# Altium schematic symbol library GNT604.SCHLIB: 37 symbols
Pins are listed as number, name and electrical type; pins without a type are passive.

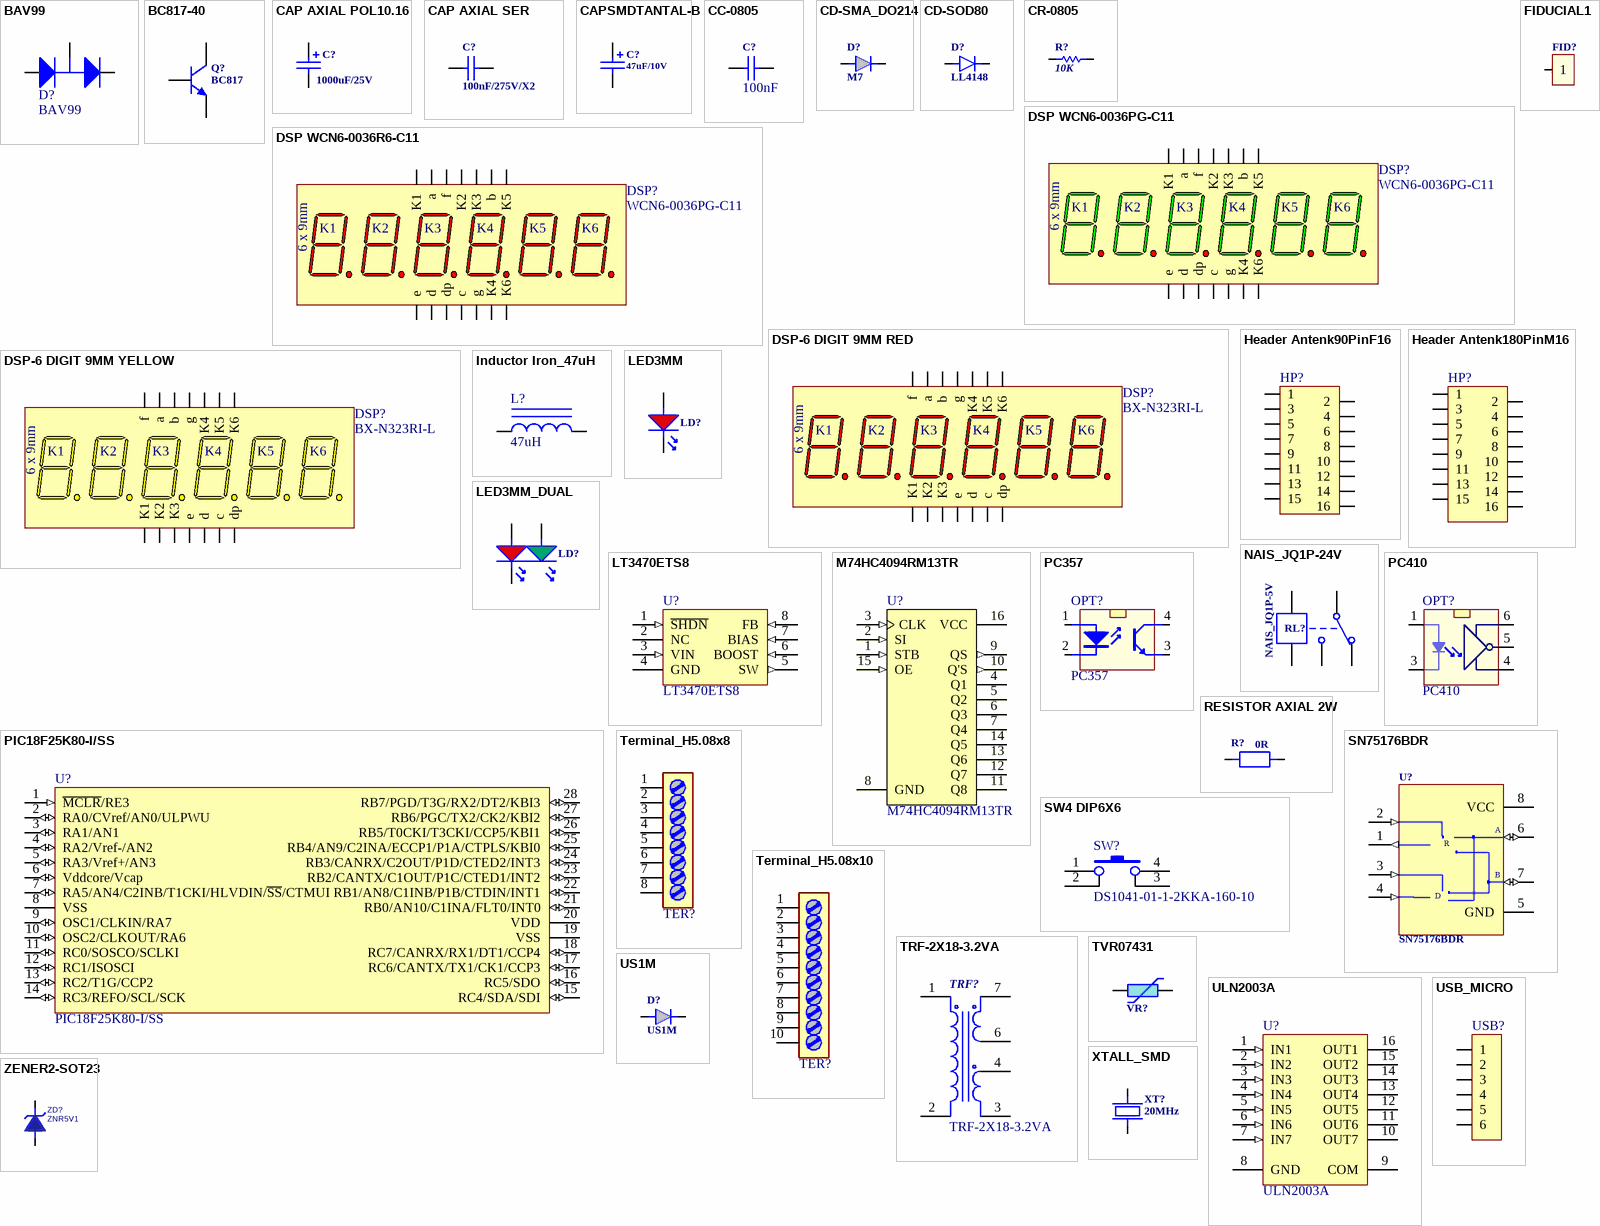
[diagram p0: symbols BAV99 to ZENER2-SOT23]

## BAV99
designator D?
Ultrafast, Soft Recovery Diode
footprint SOT23_N (SOT23, 3-Leads, Body 2.9x1.3mm, Pitch 0.95mm, Lead Span 2.3mm, IPC Medium Density)
pins: 1 A1, 2 K2, 3 AK

## BC817-40
designator Q?, comment BC817
NPN General Purpose Amplifier; Text Field7: Published 29-Sep-2000
footprint BCY-W3/D5.2
footprint SOT23
footprint SOT23_N (SOT23, 3-Leads, Body 2.9x1.3mm, Pitch 0.95mm, Lead Span 2.3mm, IPC Medium Density)
pins: 1 B, 2 E, 3 C

## CAP AXIAL POL10.16
designator C?, comment 1000uF/25V
Polarized Capacitor - Standard
footprint CAP5.08POL-10.16
simulation model CAP (Capacitor)
pins: 1 +, 2 -

## CAP AXIAL SER
designator C?, comment 100nF/275V/X2
Ceramic Capacitor - Standard
footprint CAPAXIAL/275V/X2 (Footprint not found)
simulation model CAP (Capacitor)
pins: 1, 2

## CAPSMDTANTAL-B
designator C?, comment 47uF/10V
CA45 Chip Tantalum Capacitors; Published: *; Publisher: *; Manufacturer: *; Class: *; SubClass: *
footprint CAP5.08P
footprint CAPSMDTANTAL-B
pins: 1 +, 2 -
2 alternate drawings of the same symbol

## CC-0805
designator C?, comment 100nF
Ceramic Chip Capacitor - Standard
footprint CC0805 (Footprint not found)
simulation model CAP (Capacitor)
signal-integrity model C0805
pins: 1, 2

## CD-SMA_DO214
designator D?, comment M7
ChipDiodeSMA
footprint CD-SMA_DO214 (Footprint not found)
pins: 1 A, 2 K

## CD-SOD80
designator D?, comment LL4148
ChipDiode-MiniMELF-SOD80
footprint CD-SOD80 (Footprint not found)
pins: 1 A, 2 K

## CR-0805
designator R?, comment 10K
ChipResistor0805; Published: 8-Jun-2000; LatestRevisionDate: 17-Jul-2002; LatestRevisionNote: Re-released for DXP Platform.; PackageReference: AXIAL-0.3; Publisher: Altium Limited
footprint CR0805 (Footprint not found)
simulation model RESISTOR (Resistor)
signal-integrity model Res
pins: 1, 2

## DSP WCN6-0036PG-C11
designator DSP?, comment WCN6-0036PG-C11
LED DISPLAY 9,20MM 6DIGIT (-) ULTRA GREEN; Part Number: DSP WCN6-0036PG-C11
footprint WCN6-0036XX-C11 (Footprint not found)
pins: 1 e "Anode", 2 d "Anode", 3 dp "Cathode", 4 c "Cathode", 5 g "Anode", 6 K4 "Anode", 7 K6 "Anode", 8 K5 "Anode", 9 b "Cathode", 10 K3 "Cathode", 11 K2 "Cathode", 12 f "Anode", 13 a "Anode", 14 K1 "Anode"
text: 6 x 9mm

## DSP WCN6-0036R6-C11
designator DSP?, comment WCN6-0036PG-C11
LED DISPLAY 9,20MM 6DIGIT (-) ULTRA GREEN; Part Number: WCN6-0036R6-C11
footprint WCN6-0036XX-C11 (Footprint not found)
pins: 1 e "Anode", 2 d "Anode", 3 dp "Cathode", 4 c "Cathode", 5 g "Anode", 6 K4 "Anode", 7 K6 "Anode", 8 K5 "Anode", 9 b "Cathode", 10 K3 "Cathode", 11 K2 "Cathode", 12 f "Anode", 13 a "Anode", 14 K1 "Anode"
text: 6 x 9mm

## DSP-6 DIGIT 9MM RED
designator DSP?, comment BX-N323RI-L
LED DISPLAY 9,20MM 6DIGIT (-) ULTRA RED; Package Information: Latest Revision: 19-Feb-2002; Min. Intensity: 360 ucd; Note: IF = 5 mA; Note: Pins 1 and 6 are redundant Cathodes.; Datasheet: Latest Revision: 19-Feb-2002; Package Reference: A; Publisher: Altium Limited; Colour: HE Red
footprint BX-N323RI-L
pins: A a "Anode", B b "Cathode", C c "Cathode", D d "Anode", DP dp "Cathode", E e "Anode", F f "Anode", G g "Anode", K1 "Anode", K2 "Cathode", K3 "Cathode", K4 "Anode", K5 "Anode", K6 "Anode"
text: 6 x 9mm

## DSP-6 DIGIT 9MM YELLOW
designator DSP?, comment BX-N323RI-L
LED DISPLAY 9,20MM 6DIGIT (-) ULTRA YELLOW; Package Information: Latest Revision: 19-Feb-2002; Min. Intensity: 360 ucd; Note: IF = 5 mA; Note: Pins 1 and 6 are redundant Cathodes.; Datasheet: Latest Revision: 19-Feb-2002; Package Reference: A; Publisher: Altium Limited; Colour: HE Red
footprint BX-N323RI-L
pins: A a "Anode", B b "Cathode", C c "Cathode", D d "Anode", DP dp "Cathode", E e "Anode", F f "Anode", G g "Anode", K1 "Anode", K2 "Cathode", K3 "Cathode", K4 "Anode", K5 "Anode", K6 "Anode"
text: 6 x 9mm

## FIDUCIAL1
designator FID?  (value not drawn)
footprint FIDUCIAL1
pins: 1

## Header Antenk90PinF16
designator HP?, comment DS1015-05_CONFLY  (value not drawn)
Header, 16-Pin, 90 DEGREES; Revision: 17-Jul-2002: Re-released for DXP Platform.; Publisher: Altium Limited
footprint HeaderAntenk90Pin16
signal-integrity model Connector
pins: 1, 2, 3, 4, 5, 6, 7, 8, 9, 10, 11, 12, 13, 14, 15, 16

## Header Antenk180PinM16
designator HP?, comment DS1015-07_CONFLY  (value not drawn)
Header, 16-Pin, 180 DEGREES; Revision: 17-Jul-2002: Re-released for DXP Platform.; Publisher: Altium Limited
footprint HeaderAntenk180Pin16 (Footprint not found)
signal-integrity model Connector
pins: 1, 2, 3, 4, 5, 6, 7, 8, 9, 10, 11, 12, 13, 14, 15, 16

## Inductor Iron_47uH
designator L?, comment 47uH
Magnetic-Core Inductor_SMD; Published: 24-Mar-1999; Revision: July-2002: Re-released for DXP Platform.; Publisher: Altium Limited
simulation model INDUCTOR (Inductor)
signal-integrity model Inductor Iron
footprint INDC2.5X3.3 (Chip Inductor, Body 4.5x1.6mm, IPC Low Density)
pins: 1, 2

## LED3MM
designator LD?, comment Led  (value not drawn)
Led 3mm - RED
footprint LED_3MM
pins: 1 A, 2 K

## LED3MM_DUAL
designator LD?, comment Led_dual  (value not drawn)
Led 3mm dual - RED-GREEN
footprint LEDDUAL_3MM
pins: 1 A1, 2 K1K2, 3 A2

## LT3470ETS8
designator U?
200mA, Micropower Buck Regulator; Note: 1916; Published: 30-May-2008; DatasheetVersion: Aug-2007; PackageVersion: revA, 2000; PackageReference: MS8; Publisher: Altium Limited; PackageDescription: 8-Pin Thin Small Outline Package 0.65 mm Pitch; ComponentLink1Description: Manufacturer Link; ComponentLink1URL: http://www.linear.com/; ComponentLink2Description: Datasheet; ComponentLink2URL: http://www.linear.com/pc/downloadDocument.do?navId=H0,C1,C1003,C1040,C1055,P1378,D3343
footprint TS8_N (SOT23, 5-Leads, Body 3x1.6mm, Pitch 0.95mm, Lead Span 2.8mm, IPC Medium Density)
footprint MS8_L (TSOP, 8-Leads, Body 3x3mm, Pitch 0.65mm, IPC High Density)
footprint MS8_M (TSOP, 8-Leads, Body 3x3mm, Pitch 0.65mm, IPC Low Density)
pins: 1 ~{SHDN} (in), 2 NC (power), 3 VIN (in), 4 GND (power), 5 SW (out), 6 BOOST (in), 7 BIAS (in), 8 FB (in)

## M74HC4094RM13TR
designator U?
8 Bit SIPO Shift Latch Register (3-State); Published: 8-Jun-2000; LatestRevisionDate: 6-Jun-2005; LatestRevisionNote: Stylized 3D Model Added.; DatasheetDocument: Feb-1993; PackageDocument: May-1998; PackageReference: SO16; Publisher: Altium Limited; ComponentLink1Description: Manufacturer Link; ComponentLink1URL: http://www.st.com/; ComponentLink2Description: Datasheet; ComponentLink2URL: http://www.st.com/stonline/products/literature/ds/1972/m74hc4094.pdf
footprint SO-16
pins: 1 STB (in), 2 SI (in), 3 CLK (in), 4 Q1 (hiz), 5 Q2 (hiz), 6 Q3 (hiz), 7 Q4 (hiz), 8 GND (power), 9 QS (out), 10 Q'S (out), 11 Q8 (hiz), 12 Q7 (hiz), 13 Q6 (hiz), 14 Q5 (hiz), 15 OE (in), 16 VCC (power)

## NAIS_JQ1P-24V
designator RL?, comment NAIS_JQ1P-5V
Single-Pole Dual-Throw Relay; Published: 24-Mar-1999; Revision: July-2002: Re-released for DXP Platform.; Publisher: Altium Limited
footprint NAIS_JQ1P-XXV
pins: 1 COM, 2 NC, 3 NO, 4 A1, 5 A2

## PC357
designator OPT?
Optoisolator
footprint SO-4
pins: 1 A, 2 K, 3 E, 4 C

## PC410
designator OPT?
Ultra-high Speed Response  OPIC Photocoupler
footprint SO-5 (Footprint not found)
pins: 1, 3, 4, 5, 6

## PIC18F25K80-I/SS
designator U?
Flash Microcontroller with 10-Bit A/D and nanoWatt Technology, 32K Flash, 28-Pin SSOP, Industrial Temperature Range, Tape and Reel; FirstPublished: 29-Jan-2009; LatestRevisionDate: 02-Dec-2009; LatestRevisionNote: Updated to datasheet revision F, Sep-2009; DatasheetVersion: revF, Sep-2009; PackageVersion: revBB, Aug-2009; PackageReference: SSOP-SS28; Publisher: Altium Limited; PackageDescription: 28-Lead Plastic Shrink Small Outline (SS) - 5.3mm Body [SSOP]; Supplier 1: Digi-Key; Supplier Part Number 1: PIC18F25K20T-I/SSTR-ND; Supplier 2: Digi-Key; Supplier Part Number 2: PIC18F25K20T-I/SSCT-ND; Supplier 3: Digi-Key; Supplier Part Number 3: PIC18F25K20T-I/SSDKR-ND; Supplier 4: Newark; Supplier Part Number 4: 88K5991; Code_JEDEC: MS-150; Code_IPC: SOP65P780-28; ComponentLink1Description: Datasheet; ComponentLink1URL: http://ww1.microchip.com/downloads/en/DeviceDoc/41303F.pdf; ComponentLink2Description: Packaging Specification; ComponentLink2URL: http://www.microchip.com/stellent/groups/techpub_sg/documents/packagingspec/en012702.pdf; ComponentLink3Description: Microchip.com Home; ComponentLink3URL: http://www.microchip.com/
footprint SSOP-SS28_N (SOP, 28-Leads, Body 10.2x5.2mm, Pitch 0.65mm, IPC Medium Density)
footprint SSOP-SS28_L (SOP, 28-Leads, Body 10.2x5.2mm, Pitch 0.65mm, IPC High Density)
footprint SSOP-SS28_M (SOP, 28-Leads, Body 10.2x5.2mm, Pitch 0.65mm, IPC Low Density)
pins: 1 ~{MCLR}/RE3 (in), 2 RA0/CVref/AN0/ULPWU (io), 3 RA1/AN1 (io), 4 RA2/Vref-/AN2 (io), 5 RA3/Vref+/AN3 (io), 6 Vddcore/Vcap (io), 7 RA5/AN4/C2INB/T1CKI/HLVDIN/~{SS}/CTMUI (io), 8 VSS (power), 9 OSC1/CLKIN/RA7 (io), 10 OSC2/CLKOUT/RA6 (io), 11 RC0/SOSCO/SCLKI (io), 12 RC1/ISOSCI (io), 13 RC2/T1G/CCP2 (io), 14 RC3/REFO/SCL/SCK (io), 15 RC4/SDA/SDI (io), 16 RC5/SDO (io), 17 RC6/CANTX/TX1/CK1/CCP3 (io), 18 RC7/CANRX/RX1/DT1/CCP4 (io), 19 VSS (power), 20 VDD (power), 21 RB0/AN10/C1INA/FLT0/INT0 (io), 22 RB1/AN8/C1INB/P1B/CTDIN/INT1 (io), 23 RB2/CANTX/C1OUT/P1C/CTED1/INT2 (io), 24 RB3/CANRX/C2OUT/P1D/CTED2/INT3 (io), 25 RB4/AN9/C2INA/ECCP1/P1A/CTPLS/KBI0 (io), 26 RB5/T0CKI/T3CKI/CCP5/KBI1 (io), 27 RB6/PGC/TX2/CK2/KBI2 (io), 28 RB7/PGD/T3G/RX2/DT2/KBI3 (io)

## RESISTOR AXIAL 2W
designator R?, comment 0R
Axial Resistor 2W
footprint CR-0805 (Footprint not found)
footprint RES10.16_1/4W_1
footprint RES_AXIAL2W
pins: 1, 2

## SN75176BDR
designator U?
Low-Power,RS-485/RS-422 Transceiver; PackageDocument: RevB, 21-0043; Published: 16-Jan-2001; LatestRevisionDate: 6-Jun-2005; LatestRevisionNote: Stylized 3D Model Added.; DatasheetDocument: Feb-1996; PackageReference: PA8; Publisher: Altium Limited; Code_JEDEC: MS-001-AB; ComponentLink1Description: Manufacturer Link; ComponentLink1URL: http://www.maxim-ic.com/; ComponentLink2Description: Datasheet; ComponentLink2URL: http://pdfserv.maxim-ic.com/en/ds/MAX1487-MAX491.pdf
footprint SO-8
3D model SO-8 (PCB3D Model)
pins: 1 RO (out), 2 ~{RE} (in), 3 DE (in), 4 DI (in), 5 GND (power), 6 A (io), 7 B (io), 8 VCC (power)
text: R; D

## SW4 DIP6X6
designator SW?, comment DS1041-01-1-2KKA-160-10
TACHT SWITCH DIP6X6
footprint SW4 DIP6X6 (Footprint not found)
pins: 1, 2, 3, 4

## Terminal_H5.08x8
designator TER?  (value not drawn)
Terminal Block Horizontal 5.08mm 8 pin
footprint PHONIX2(5.08)
footprint Terminal_H5.08x8
pins: 1, 2, 3, 4, 5, 6, 7, 8

## Terminal_H5.08x10
designator TER?  (value not drawn)
Terminal Block Horizontal 5.08mm 10 pin
footprint PHONIX2(5.08)
footprint Terminal_H5.08x10 (Footprint not found)
pins: 1, 2, 3, 4, 5, 6, 7, 8, 9, 10

## TRF-2X18-3.2VA
designator TRF?
Text Field7: Published 8-Jun-2000
footprint TRF-EI38/13,5
pins: 1 Pri+, 2 Pri-, 3 Sec1+, 4 Sec1-, 6 Sec2+, 7 Sec2-

## TVR07431
designator VR?  (value not drawn)
Varistor (Voltage-Sensitive Resistor)-275V; Published: 24-Mar-1999; Revision: July-2002: Re-released for DXP Platform.; Publisher: Altium Limited
footprint TVR07431 (Footprint not found)
pins: 1, 2

## ULN2003A
designator U?
Seven Darlington Array; Published: 8-Jun-2000; LatestRevisionDate: 13-Apr-2006; LatestRevisionNote: IPC-7351 Footprint Added.; DatasheetVersion: Sep-1998; PackageVersion: May-1998; PackageReference: SO16; Publisher: Altium Limited; PackageDescription: 16-Pin Small Outline Integrated Circuit 1.27 mm Pitch; Code_IPC: SOIC127P600-16; ComponentLink1Description: Manufacturer Link; ComponentLink1URL: http://www.st.com/; ComponentLink2Description: Datasheet; ComponentLink2URL: http://www.st.com/stonline/products/literature/ds/5279/uln2001.pdf
footprint SO-16
footprint SO16_L (SOIC, 16-Leads, Body 9.9x3.9mm, Pitch 1.27mm, IPC High Density)
footprint SO16_M (SOIC, 16-Leads, Body 9.9x3.9mm, Pitch 1.27mm, IPC Low Density)
3D model SO16 (16-Pin Small Outline Integrated Circuit 1.27 mm Pitch)
pins: 1 IN1 (in), 2 IN2 (in), 3 IN3 (in), 4 IN4 (in), 5 IN5 (in), 6 IN6 (in), 7 IN7 (in), 8 GND (power), 9 COM, 10 OUT7 (oc), 11 OUT6 (oc), 12 OUT5 (oc), 13 OUT4 (oc), 14 OUT3 (oc), 15 OUT2 (oc), 16 OUT1 (oc)

## US1M
designator D?
ChipDiodeSMA, ultra fast diode
footprint CD-SMA_DO214 (DO-214-AC/SMA; 2 C-Bend Leads; Body 5 x 2.7 mm, inc. leads (LxW))
pins: 1 A, 2 K

## USB_MICRO
designator USB?  (value not drawn)
Connector; USB2.0, Type A, SM; 5 Position; Right Angle; Revision: 17-Jul-2002: Re-released for DXP Platform.; Publisher: Altium Limited
footprint MICRO_USB (Connector; USB2.0, Type A, SM; 5 Position; Right Angle)
signal-integrity model Connector
pins: 1, 2, 3, 4, 5, 6

## XTALL_SMD
designator XT?, comment 20MHz
HS-XTALL(SMD)
footprint HC49/4H_SMX (Footprint not found)
pins: 1, 2

## ZENER2-SOT23
designator ZD?, comment ZNR5V1
Zener Diode
footprint SOT23
footprint SOT23_N (SOT23, 3-Leads, Body 2.9x1.3mm, Pitch 0.95mm, Lead Span 2.3mm, IPC Medium Density)
pins: 1 A, 3 K